# Altium integrated library LFXTAL056346.IntLib: 1 symbol
Pins are listed as number, name and electrical type; pins without a type are passive.

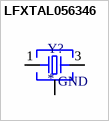
[diagram p0: symbol LFXTAL056346]

## LFXTAL056346
designator Y?
MF: {'manufacturer': u'IQD Frequency Products'}; MP: LFXTAL056346; Package: None; Price: None; Value: *; Availability: Unavailable
footprint WE-XTAL_LFXTAL056346
pins: 1, 2 GND, 3 2, 4 GND